# Altium schematic symbol library Res2012.SchLib: 2 symbols
Pins are listed as number, name and electrical type; pins without a type are passive.

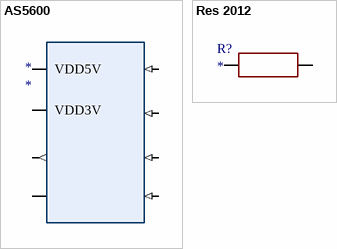
[diagram p0: symbols AS5600 to Res 2012]

## AS5600
designator *
footprint PCBComponent_1; pin to pad 2>3 3>2
pins: 1 VDD5V (power), 2 VDD3V (power), 3 OUT (out), 4 GND (power), 5 DIR (in), 6 SCL (in), 7 SDA (in), 8 GPO (in)

## Res 2012
designator R?
footprint Res2012
pins: 1, 2